# Altium schematic symbol library 1725698.SchLib: 1 symbol
Pins are listed as number, name and electrical type; pins without a type are passive.

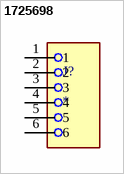
[diagram p0: symbol 1725698]

## 1725698
designator J?
PCB Terminal Screw 2.54mm 20AWG 160V 6A 6 Position COMBICON MPT Series | Phoenix Contact 1725698; SnapEDA_Link: https://www.snapeda.com/parts/1725698/Phoenix+Contact/view-part/?ref=snap; Package: None; Value: *; MF: Phoenix Contact; MP: 1725698; Check_prices: https://www.snapeda.com/parts/1725698/Phoenix+Contact/view-part/?ref=eda
footprint PHOENIX_1725698
pins: 1, 2, 3, 4, 5, 6